# Altium footprint library SOIC127P600X170-9N.PcbLib: 2 footprints
Each footprint in its own frame and in the unit in brackets; x right, y up, seen from the top. Pads: shape width x height; smd on the part's side, far side on the other; paste and mask are expansions set on the pad; w line width, h text height; cw(c..) or ccw(c..) is an arc to the next point about the centre after c.
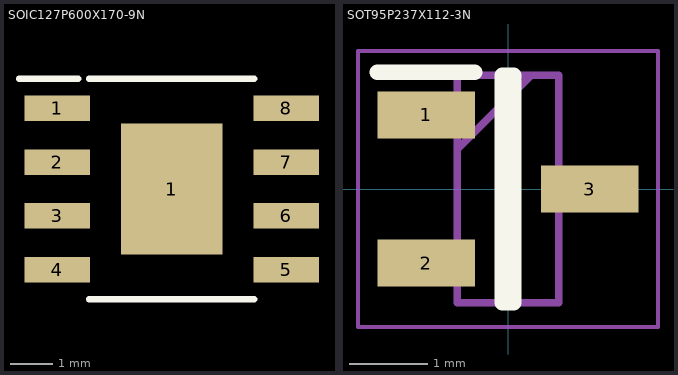
[diagram p0: the footprints below, top view; thin cyan lines are the x and y axes]

## SOIC127P600X170-9N [mm] "HSOIC-8 (TI DDA) with thermal pad, 1.27 mm pitch, 6.0 mm lead span"
pads (9):
  rect 1.55x0.6 smd: 1(1267.3,1271.905) 2(1267.3,1270.635) 3(1267.3,1269.365) 4(1267.3,1268.095) 5(1272.7,1268.095) 6(1272.7,1269.365) 7(1272.7,1270.635) 8(1272.7,1271.905)
  rect 2.4x3.1 smd: 1(1270,1270)
Top Overlay:
  lines w0.15: 1266.4,1272.6 1267.8,1272.6 ; 1268.05,1267.4 1271.95,1267.4 ; 1268.05,1272.6 1271.95,1272.6

## SOT95P237X112-3N [mm]
pads (3):
  rect 1.25x0.6 smd: 1(-1.05,0.95) 2(-1.05,-0.95) 3(1.05,0)
Top Overlay:
  lines w0.2: -1.675,1.5 -0.425,1.5 ; -0.075,-1.46 -0.075,1.46 0.075,1.46 0.075,-1.46 -0.075,-1.46
Mechanical 15:
  lines w0.1: -0.65,0.51 0.3,1.46 ; -0.65,-1.46 -0.65,1.46 0.65,1.46 0.65,-1.46 -0.65,-1.46
Mechanical 20:
  lines w0.05: -1.925,-1.77 -1.925,1.77 1.925,1.77 1.925,-1.77 -1.925,-1.77